# Altium footprint library 1.10-电容.PcbLib: 193 footprints (part 11 of 13)
Each footprint in its own frame and in the unit in brackets; x right, y up, seen from the top. Pads: shape width x height; smd on the part's side, far side on the other; paste and mask are expansions set on the pad; w line width, h text height; cw(c..) or ccw(c..) is an arc to the next point about the centre after c.
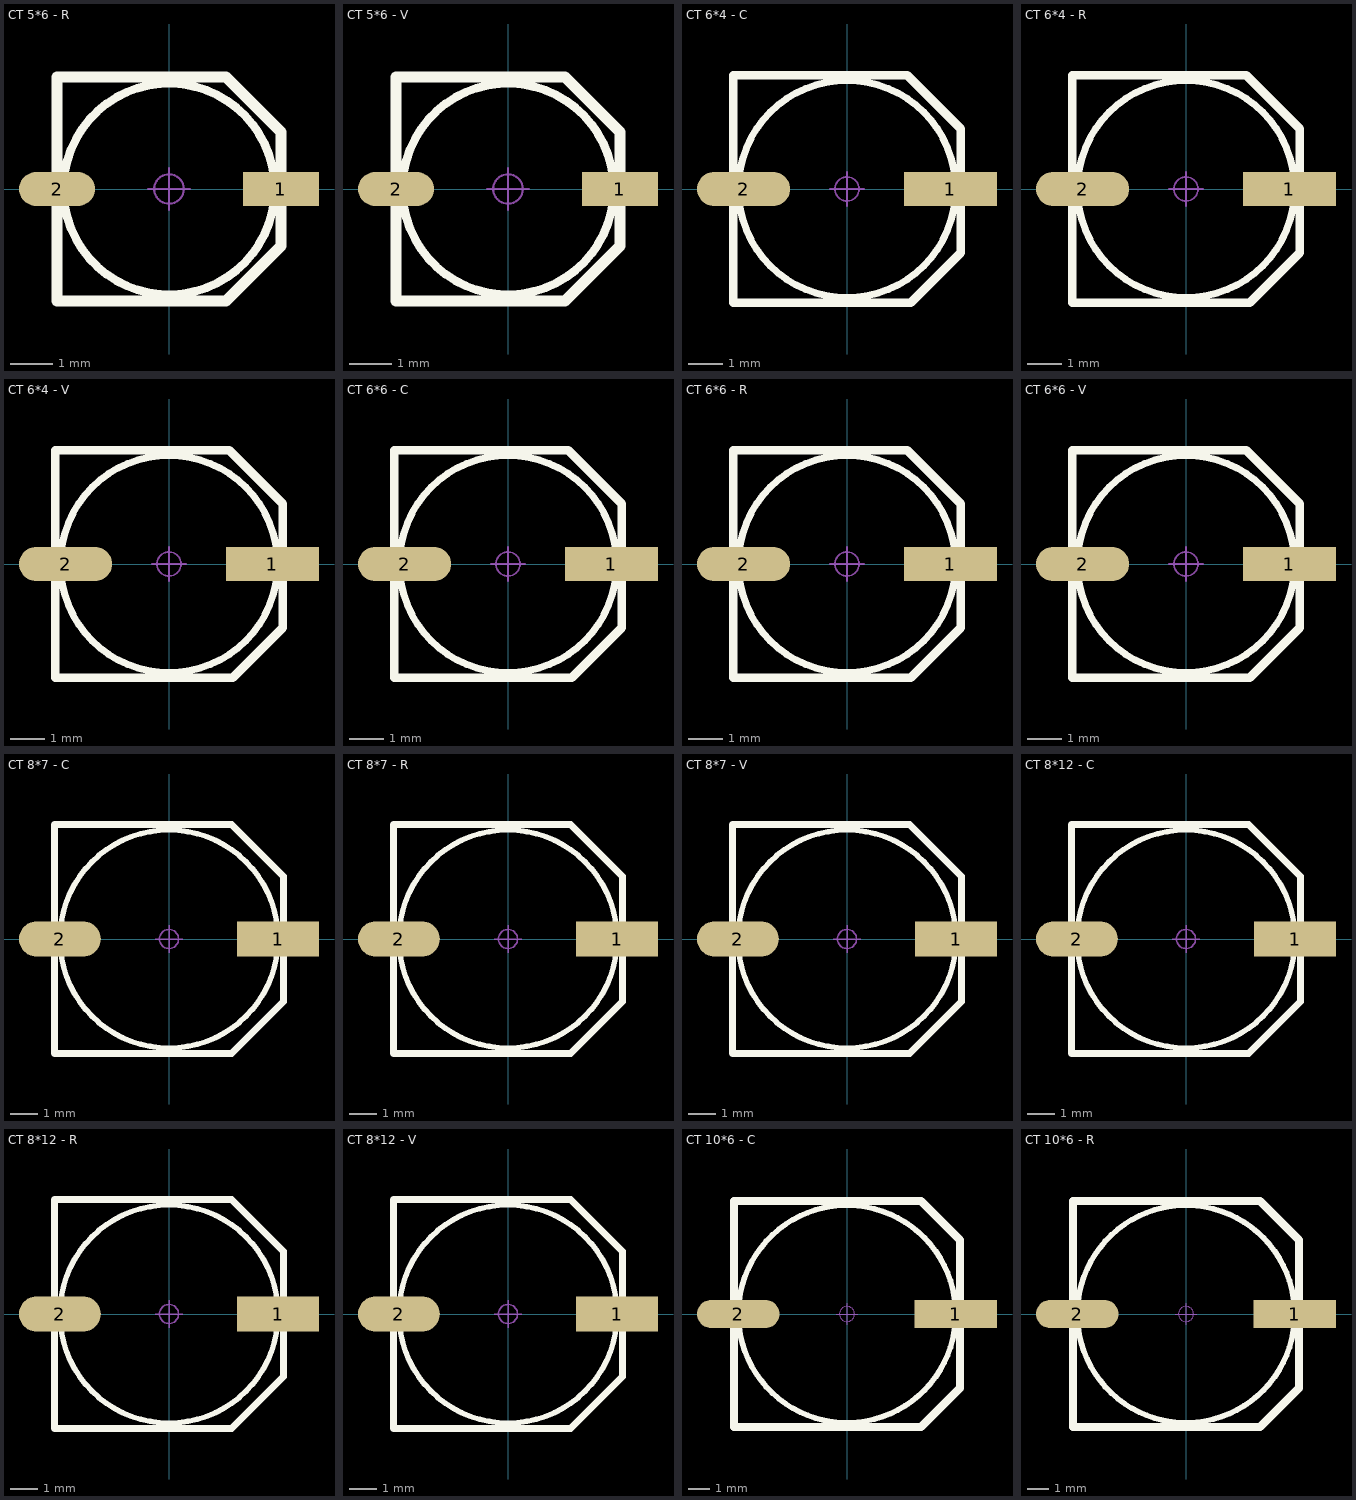
[diagram p10: the footprints below, top view; thin cyan lines are the x and y axes]

## CT 5*6 - R [mm] "直径5mm，高6mm                                      淘宝ID:黄晶宝石"
pads (2):
  rect 1.8x0.8 smd: 1(2.65,0)
  oval 1.8x0.8 smd: 2(-2.65,0)
Top Overlay:
  circle w0.2: c0,0 r2.5
  lines w0.254: -2.65,-2.65 1.35,-2.65 2.65,-1.35 2.65,1.35 1.35,2.65 -2.65,2.65 -2.65,-2.65
Mechanical 15:
  circle w0.05: c0,0 r0.35
  lines w0.05: -0.5,0 0.5,0 ; 0,-0.5 0,0.5
3D body "CT 5X6-R.STEP": height 6, standoff -0.01, extent -2.95,-2.65 2.95,2.65

## CT 5*6 - V [mm] "直径5mm，高6mm                               淘宝ID:黄晶宝石"
pads (2):
  rect 1.8x0.8 smd: 1(2.65,0)
  oval 1.8x0.8 smd: 2(-2.65,0)
Top Overlay:
  circle w0.2: c0,0 r2.5
  lines w0.254: -2.65,-2.65 -2.65,2.65 1.35,2.65 2.65,1.35 2.65,-1.35 1.35,-2.65 -2.65,-2.65
Mechanical 15:
  circle w0.05: c0,0 r0.35
  lines w0.05: -0.5,0 0.5,0 ; 0,-0.5 0,0.5
3D body "CT 5X6-V.STEP": height 6, standoff -0.01, extent -2.95,-2.65 2.95,2.65

## CT 6*4 - C [mm] "直径6mm，高4mm                                   淘宝ID:黄晶宝石"
pads (2):
  rect 2.7x1 smd: 1(3,0)
  oval 2.7x1 smd: 2(-3,0)
Top Overlay:
  circle w0.2: c0,0 r3.15
  lines w0.254: -3.3,-3.3 -3.3,3.3 1.75,3.3 3.3,1.75 3.3,-1.85 1.85,-3.3 -3.3,-3.3
Mechanical 15:
  circle w0.05: c0,0 r0.35
  lines w0.05: -0.5,0 0.5,0 ; 0,-0.5 0,0.5
3D body "CT 6X4-C.STEP": height 4, standoff -0.01, extent -3.5,-3.15 3.5,3.15

## CT 6*4 - R [mm] "直径6mm，高4mm                                淘宝ID:黄晶宝石"
pads (2):
  rect 2.7x1 smd: 1(3,0)
  oval 2.7x1 smd: 2(-3,0)
Top Overlay:
  circle w0.2: c0,0 r3.15
  lines w0.254: -3.3,-3.3 -3.3,3.3 1.75,3.3 3.3,1.75 3.3,-1.85 1.85,-3.3 -3.3,-3.3
Mechanical 15:
  circle w0.05: c0,0 r0.35
  lines w0.05: -0.5,0 0.5,0 ; 0,-0.5 0,0.5
3D body "CT 6X4-R.STEP": height 4, standoff -0.01, extent -3.5,-3.15 3.5,3.15

## CT 6*4 - V [mm] "直径6mm，高4mm                              淘宝ID:黄晶宝石"
pads (2):
  rect 2.7x1 smd: 1(3,0)
  oval 2.7x1 smd: 2(-3,0)
Top Overlay:
  circle w0.2: c0,0 r3.15
  lines w0.254: -3.3,-3.3 -3.3,3.3 1.75,3.3 3.3,1.75 3.3,-1.85 1.85,-3.3 -3.3,-3.3
Mechanical 15:
  circle w0.05: c0,0 r0.35
  lines w0.05: -0.5,0 0.5,0 ; 0,-0.5 0,0.5
3D body "CT 6X4-V.STEP": height 4, standoff -0.01, extent -3.5,-3.15 3.5,3.15

## CT 6*6 - C [mm] "直径6mm，高6mm                                  淘宝ID:黄晶宝石"
pads (2):
  rect 2.7x1 smd: 1(3,0)
  oval 2.7x1 smd: 2(-3,0)
Top Overlay:
  circle w0.2: c0,0 r3.15
  lines w0.254: -3.3,-3.3 1.85,-3.3 3.3,-1.85 3.3,1.75 1.75,3.3 -3.3,3.3 -3.3,-3.3
Mechanical 15:
  circle w0.05: c0,0 r0.35
  lines w0.05: -0.5,0 0.5,0 ; 0,-0.5 0,0.5
3D body "CT 6X6-C.STEP": height 6, standoff -0.01, extent -3.5,-3.15 3.5,3.15

## CT 6*6 - R [mm] "直径6mm，高6mm                               淘宝ID:黄晶宝石"
pads (2):
  rect 2.7x1 smd: 1(3,0)
  oval 2.7x1 smd: 2(-3,0)
Top Overlay:
  circle w0.2: c0,0 r3.15
  lines w0.254: -3.3,-3.3 1.85,-3.3 3.3,-1.85 3.3,1.75 1.75,3.3 -3.3,3.3 -3.3,-3.3
Mechanical 15:
  circle w0.05: c0,0 r0.35
  lines w0.05: -0.5,0 0.5,0 ; 0,-0.5 0,0.5
3D body "CT 6X6-R.STEP": height 6, standoff -0.01, extent -3.5,-3.15 3.5,3.15

## CT 6*6 - V [mm] "直径6mm，高6mm                             淘宝ID:黄晶宝石"
pads (2):
  rect 2.7x1 smd: 1(3,0)
  oval 2.7x1 smd: 2(-3,0)
Top Overlay:
  circle w0.2: c0,0 r3.15
  lines w0.254: -3.3,-3.3 1.85,-3.3 3.3,-1.85 3.3,1.75 1.75,3.3 -3.3,3.3 -3.3,-3.3
Mechanical 15:
  circle w0.05: c0,0 r0.35
  lines w0.05: -0.5,0 0.5,0 ; 0,-0.5 0,0.5
3D body "CT 6X6-V.STEP": height 6, standoff -0.01, extent -3.5,-3.15 3.5,3.15

## CT 8*7 - C [mm] "直径8mm，高7mm                            淘宝ID:黄晶宝石"
pads (2):
  rect 3x1.3 smd: 1(4,0)
  oval 3x1.3 smd: 2(-4,0)
Top Overlay:
  circle w0.2: c0,0 r4
  lines w0.254: -4.2,-4.2 -4.2,4.2 2.3,4.2 4.2,2.3 4.2,-2.3 2.3,-4.2 -4.2,-4.2
Mechanical 15:
  circle w0.05: c0,0 r0.35
  lines w0.05: -0.5,0 0.5,0 ; 0,-0.5 0,0.5
3D body "CT 8X7-C.STEP": height 7, standoff -0.01, extent -4.5,-4.15 4.5,4.15

## CT 8*7 - R [mm] "直径8mm，高7mm                              淘宝ID:黄晶宝石"
pads (2):
  rect 3x1.3 smd: 1(4,0)
  oval 3x1.3 smd: 2(-4,0)
Top Overlay:
  circle w0.2: c0,0 r4
  lines w0.254: -4.2,-4.2 -4.2,4.2 2.3,4.2 4.2,2.3 4.2,-2.3 2.3,-4.2 -4.2,-4.2
Mechanical 15:
  circle w0.05: c0,0 r0.35
  lines w0.05: -0.5,0 0.5,0 ; 0,-0.5 0,0.5
3D body "CT 8X7-R.STEP": height 7, standoff -0.01, extent -4.5,-4.15 4.5,4.15

## CT 8*7 - V [mm] "直径8mm，高7mm                           淘宝ID:黄晶宝石"
pads (2):
  rect 3x1.3 smd: 1(4,0)
  oval 3x1.3 smd: 2(-4,0)
Top Overlay:
  circle w0.2: c0,0 r4
  lines w0.254: -4.2,-4.2 -4.2,4.2 2.3,4.2 4.2,2.3 4.2,-2.3 2.3,-4.2 -4.2,-4.2
Mechanical 15:
  circle w0.05: c0,0 r0.35
  lines w0.05: -0.5,0 0.5,0 ; 0,-0.5 0,0.5
3D body "CT 8X7-V.STEP": height 7, standoff -0.01, extent -4.5,-4.15 4.5,4.15

## CT 8*12 - C [mm] "直径8mm，高12mm"
pads (2):
  rect 3x1.3 smd: 1(4,0)
  oval 3x1.3 smd: 2(-4,0)
Top Overlay:
  circle w0.2: c0,0 r4
  lines w0.254: -4.2,-4.2 2.3,-4.2 4.2,-2.3 4.2,2.3 2.3,4.2 -4.2,4.2 -4.2,-4.2
Mechanical 15:
  circle w0.05: c0,0 r0.35
  lines w0.05: -0.5,0 0.5,0 ; 0,-0.5 0,0.5
3D body "CT 8X12-C.STEP": height 12, standoff -0.01, extent -4.5,-4.15 4.5,4.15

## CT 8*12 - R [mm] "直径8mm，高12mm                              淘宝ID:黄晶宝石"
pads (2):
  rect 3x1.3 smd: 1(4,0)
  oval 3x1.3 smd: 2(-4,0)
Top Overlay:
  circle w0.2: c0,0 r4
  lines w0.254: -4.2,-4.2 2.3,-4.2 4.2,-2.3 4.2,2.3 2.3,4.2 -4.2,4.2 -4.2,-4.2
Mechanical 15:
  circle w0.05: c0,0 r0.35
  lines w0.05: -0.5,0 0.5,0 ; 0,-0.5 0,0.5
3D body "CT 8X12-R.STEP": height 12, standoff -0.01, extent -4.5,-4.15 4.5,4.15

## CT 8*12 - V [mm] "直径8mm，高12mm                      淘宝ID:黄晶宝石"
pads (2):
  rect 3x1.3 smd: 1(4,0)
  oval 3x1.3 smd: 2(-4,0)
Top Overlay:
  circle w0.2: c0,0 r4
  lines w0.254: -4.2,-4.2 2.3,-4.2 4.2,-2.3 4.2,2.3 2.3,4.2 -4.2,4.2 -4.2,-4.2
Mechanical 15:
  circle w0.05: c0,0 r0.35
  lines w0.05: -0.5,0 0.5,0 ; 0,-0.5 0,0.5
3D body "CT 8X12-V.STEP": height 12, standoff -0.01, extent -4.5,-4.15 4.5,4.15

## CT 10*6 - C [mm] "直径10mm，高6mm                            淘宝ID:黄晶宝石"
pads (2):
  rect 3.8x1.3 smd: 1(5,0)
  oval 3.8x1.3 smd: 2(-5,0)
Top Overlay:
  circle w0.254: c0,0 r5
  lines w0.381: 5.191,-3.413 3.404,-5.2 -5.2,-5.2 -5.2,5.2 3.404,5.2 5.2,3.404 5.2,-3.404
Mechanical 15:
  circle w0.05: c0,0 r0.35
  lines w0.05: -0.5,0 0.5,0 ; 0,-0.5 0,0.5
3D body "CT 10X6-C.STEP": height 6, standoff -0.01, extent -5.8,-5.15 5.8,5.15

## CT 10*6 - R [mm] "直径10mm，高6mm                        淘宝ID:黄晶宝石"
pads (2):
  rect 3.8x1.3 smd: 1(5,0)
  oval 3.8x1.3 smd: 2(-5,0)
Top Overlay:
  circle w0.254: c0,0 r5
  lines w0.381: 5.191,-3.413 3.404,-5.2 -5.2,-5.2 -5.2,5.2 3.404,5.2 5.2,3.404 5.2,-3.404
Mechanical 15:
  circle w0.05: c0,0 r0.35
  lines w0.05: -0.5,0 0.5,0 ; 0,-0.5 0,0.5
3D body "CT 10X6-R.STEP": height 6, standoff -0.01, extent -5.8,-5.15 5.8,5.15